# Altium footprint library PCB - POWER - TDK100-24S24W.PCBLIB: 1 footprints
Each footprint in its own frame and in the unit in brackets; x right, y up, seen from the top. Pads: shape width x height; smd on the part's side, far side on the other; paste and mask are expansions set on the pad; w line width, h text height; cw(c..) or ccw(c..) is an arc to the next point about the centre after c.
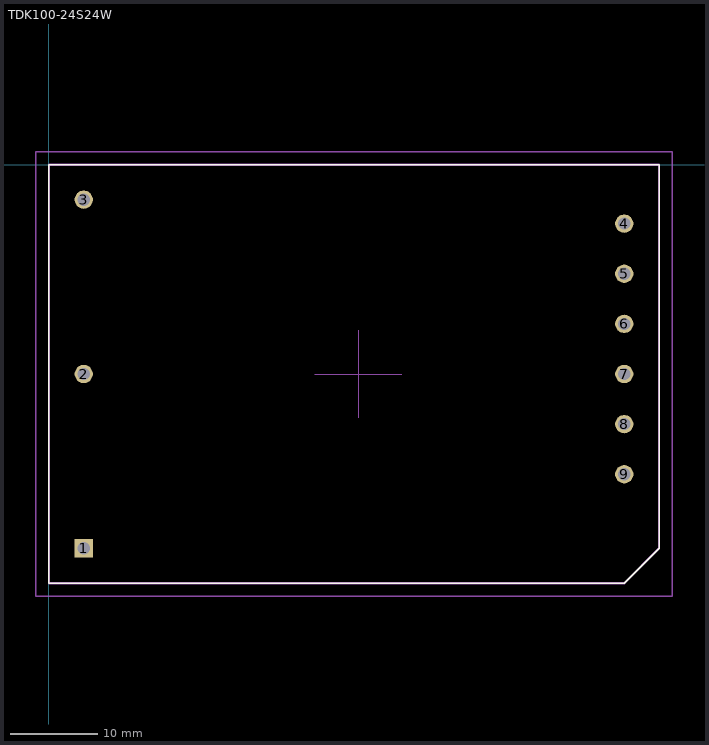
[diagram p0: the footprint, top view; thin cyan lines are the x and y axes]

## TDK100-24S24W [mm]
pads (9):
  rect 2.1x2.1 hole 1.4: 1(4,-44)
  round 2.1 hole 1.4: 2(4,-24) 3(4,-4) 4(66,-6.75) 5(66,-12.5) 6(66,-18.25) 7(66,-24) 8(66,-29.75) 9(66,-35.5)
Top Overlay:
  lines w0.15: 0,-48 0,0 70,0 70,-44 66,-48 0,-48
Top Assembly:
  lines w0.254: 66,-48 0,-48 0,0 70,0 70,-44 ; 66,-48 66,-48 ; 66,-48 70,-44 ; 70,-44 70,-44
Top Courtyard:
  lines w0.15: -1.5,-49.5 -1.5,1.5 71.5,1.5 71.5,-49.5 -1.5,-49.5
Top Designator:
  text ".Designator" at 6.502,2.5 h1.5
Top Component Center:
  lines w0.05: 30.5,-24 40.5,-24 ; 35.5,-29 35.5,-19
3D body: height 23.5, standoff 0, extent 0,-48 70,0